# Altium footprint library Transistor.PcbLib: 8 footprints
Each footprint in its own frame and in the unit in brackets; x right, y up, seen from the top. Pads: shape width x height; smd on the part's side, far side on the other; paste and mask are expansions set on the pad; w line width, h text height; cw(c..) or ccw(c..) is an arc to the next point about the centre after c.
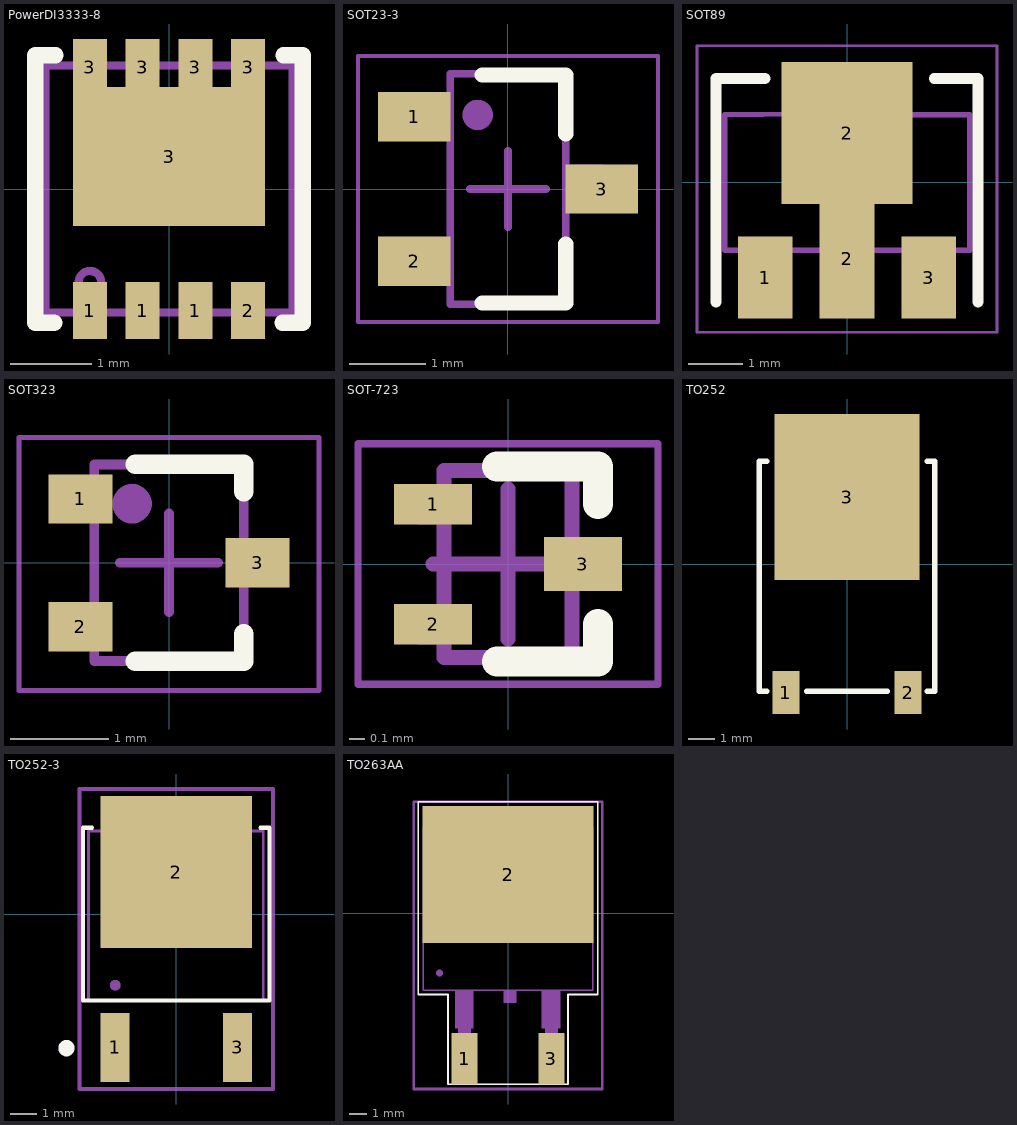
[diagram p0: the footprints below, top view; thin cyan lines are the x and y axes]

## PowerDI3333-8 [mm]
pads (9):
  rect 0.42x0.7 smd: 1(-0.975,-1.5) 1(-0.325,-1.5) 1(0.325,-1.5) 2(0.975,-1.5) 3(-0.975,1.5) 3(-0.325,1.5) 3(0.325,1.5) 3(0.975,1.5)
  rect 2.37x1.71 smd: 3(0,0.4)
Top Overlay:
  lines w0.2: -1.416,-1.65 -1.65,-1.65 -1.65,1.65 -1.4,1.65 ; 1.4,-1.65 1.65,-1.65 1.65,1.65 1.412,1.65
Top Assembly (Mech13):
  circle w0.1: c-0.975,-1.15 r0.139
  rectangle: 0.815,1.55 1.135,1.65
  rectangle: 0.165,1.55 0.485,1.65
  rectangle: -0.485,1.55 -0.165,1.65
  rectangle: -1.135,1.55 -0.815,1.65
  region: 1.65,0 1.525,0 1.525,-0.1 1.65,-0.1
  rectangle: -1.65,-0.1 -1.525,0
  rectangle: 0.815,-1.65 1.135,-1.55
  rectangle: 0.165,-1.65 0.485,-1.55
  rectangle: -0.485,-1.65 -0.165,-1.55
  rectangle: -1.135,-1.65 -0.815,-1.55
  lines w0.1: -1.525,-1.525 -1.525,1.525 1.525,1.525 1.525,-1.525 -1.525,-1.525
  text ".Designator" at -2.499,-0.167 h0.5
3D body "PowerDI3333-8_Type-UX.STP": height 0.76, standoff 0.01, extent -1.65,-1.65 1.65,1.65

## SOT23-3 [mm] "SOT23, 3-Leads, Body 2.92x2.51mm, Pitch 0.95mm, IPC Medium Density"
height 1.12
pads (3):
  rect 0.95x0.65 smd: 1(-1.235,0.95) 2(-1.235,-0.95) 3(1.235,0)
Top Overlay:
  lines w0.2: -0.34,-1.5 0.76,-1.5 0.76,-0.725 ; -0.34,1.5 0.76,1.5 0.76,0.725
Top Assembly (Mech13):
  circle w0.3: c-0.4,0.975 r0.05
  rectangle: -1.26,0.65 -0.76,1.275
  rectangle: -1.26,-1.275 -0.76,-0.65
  rectangle: 0.76,-0.3 1.26,0.325
  lines w0.1: -0.76,-1.52 0.76,-1.52 0.76,1.52 -0.76,1.52 -0.76,-1.52
  text ".Designator" at -0.217,3.249 h0.65
Mechanical 15:
  lines w0.05: -1.975,-1.75 1.975,-1.75 1.975,1.75 -1.975,1.75 -1.975,-1.75
  lines w0.1: -0.5,0 0.5,0 ; 0,-0.5 0,0.5
3D body "SOT-23.step": height 1.11, standoff 0.01, extent -1.283,-1.5 1.217,1.5

## SOT89 [mm]
pads (4):
  rect 1x1.5 smd: 1(-1.5,-1.75) 3(1.5,-1.75)
  rect 1x2.2 smd: 2(0,-1.4)
  rect 2.4x2.6 smd: 2(0,0.9)
Top Overlay:
  lines w0.2: -2.4,-2.2 -2.4,1.9 -1.5,1.9 ; 1.6,1.9 2.4,1.9 2.4,-2.2
Top Assembly (Mech13):
  region: 1.275,-2.25 1.725,-2.25 1.725,-1.25 1.275,-1.25
  region: -0.225,-2.25 0.225,-2.25 0.225,-1.25 -0.225,-1.25
  region: -1.725,-2.25 -1.275,-2.25 -1.275,-1.25 -1.725,-1.25
  region: -0.8,1.25 0.8,1.25 0.8,1.5 0.55,1.75 -0.55,1.75 -0.8,1.5
  lines w0.1: 0.8,1.25 -0.8,1.25 ; -0.8,1.25 -2.24,1.24 -2.24,-1.25 2.25,-1.25 2.25,1.24 0.8,1.24 0.8,1.5 0.55,1.75 -0.55,1.75 -0.8,1.5 -0.8,1.25
  text ".Designator" at -2.499,-0.167 h0.5
Mechanical 15:
  lines w0.05: -2.75,-2.75 -2.75,2.5 2.75,2.5 2.75,-2.75 -2.75,-2.75
  lines w0.1: -0.5,0 0.5,0 ; 0,-0.5 0,0.5
3D body "SOT-89.step": height 1.51, standoff 0.01, extent -2.25,-2.25 2.25,1.75

## SOT323 [mm] "SOT23, 3-Leads, Body 2.92x2.51mm, Pitch 0.95mm, IPC Medium Density"
height 1.12
pads (3):
  rect 0.65x0.5 smd: 1(-0.9,0.65) 2(-0.9,-0.65) 3(0.9,0)
Top Overlay:
  lines w0.2: -0.34,-1 0.76,-1 0.76,-0.725 ; -0.34,1 0.76,1 0.76,0.725
Top Assembly (Mech13):
  circle w0.3: c-0.375,0.6 r0.05
  rectangle: -1.05,0.5 -0.76,0.8
  rectangle: -1.05,-0.8 -0.757,-0.5
  rectangle: 0.76,-0.15 1.05,0.15
  lines w0.1: -0.76,-1 0.76,-1 0.76,1 -0.76,1 -0.76,-1
  text ".Designator" at 0.118,1.465 h0.3
Mechanical 15:
  lines w0.05: -1.525,-1.3 1.525,-1.3 1.525,1.275 -1.525,1.275 -1.525,-1.3
  lines w0.1: -0.5,0 0.5,0 ; 0,-0.5 0,0.5
3D body "SOT-323 v0.step": height 0.96, standoff 0.01, extent -1.05,-1 1.05,1

## SOT-723 [mm] "SOT23, 3-Leads, Body 1.20x1.20mm, Pitch 0.40mm, IPC Medium Density"
height 0.55
pads (3):
  rect 0.52x0.27 smd: 1(-0.5,0.4) 2(-0.5,-0.4)
  rect 0.52x0.36 smd: 3(0.5,0)
Top Overlay:
  lines w0.2: -0.075,-0.65 0.425,-0.65 0.6,-0.65 0.6,-0.4 ; -0.075,0.65 0.425,0.65 0.6,0.65 0.6,0.4
Top Assembly (Mech13):
  rectangle: -0.6,0.265 -0.423,0.535
  rectangle: -0.6,-0.535 -0.42,-0.265
  rectangle: 0.425,-0.18 0.6,0.18
  lines w0.1: -0.425,-0.625 0.425,-0.625 0.425,0.625 -0.425,0.625 -0.425,-0.625
  text ".Designator" at 0.1,-0.581 h0.2
Mechanical 15:
  lines w0.05: -1,-0.8 1,-0.8 1,0.8 -1,0.8 -1,-0.8
  lines w0.1: -0.5,0 0.5,0 ; 0,-0.5 0,0.5
3D body "SOT-723.step": height 0.55, standoff 0, extent -0.6,-0.6 0.6,0.6

## TO252 [mm]
pads (3):
  rect 1x1.6 smd: 1(-2.28,-4.8) 2(2.28,-4.8)
  rect 5.4x6.2 smd: 3(0,2.5)
Top Overlay:
  lines w0.2: -3.277,-4.75 -3,-4.75 ; -3.277,3.835 -3,3.835 ; -1.5,-4.75 1.5,-4.75 ; 3,-4.75 3.277,-4.75 ; 3,3.835 3.277,3.835
  lines w0.203: -3.277,-4.75 -3.277,3.835 ; 3.277,3.835 3.277,-4.75
3D body "TO-252AA.step": height 2.31, standoff 0.01, extent -3.29,-5.473 3.29,4.227

## TO252-3 [mil]
pads (3):
  rect 42x102 smd paste+0 mask+0: 1(-90,-195.87) 3(90,-195.87)
  rect 222x224 smd paste-112 mask-112: 2(0,62)
Top Overlay:
  circle w20: c-161.42,-196.85 r1.93
  lines w6: -124.1,127 -137,127 -137,-127 137,-127 137,127 124.1,127
Top Assembly (Mech13):
  circle w11.81: c-89.57,-104.41 r1.97
  rectangle: -105.22,-228.78 -75.1,-144.87
  rectangle: 74.78,-228.78 104.9,-144.87
  rectangle: -102.47,122.4 102.36,162.49
  lines w3.94: -128.94,122.05 -128.94,-126.97 127.95,-126.97 127.95,122.4 -128.94,122.4
  text ".Designator" at -148.21,-10.11 h29.53
Mechanical 15:
  lines w6: -142,-256.87 -142,184 142,184 142,-256.87 -142,-256.87
3D body "TO-252AA.step": height 91.05, standoff 0.5, extent -129.52,-215.48 129.52,166.41

## TO263AA [mm]
pads (3):
  rect 1.5x3 smd: 1(-2.54,-8.5) 3(2.54,-8.5)
  rect 10x8 smd: 2(0,2.25)
Top Overlay:
  lines w0.1: -5.25,-4.75 -5.25,6.5 0,6.5 5.25,6.5 5.25,-4.75 3.5,-4.75 3.5,-10 0,-10 -3.5,-10 -3.5,-4.75 -5.25,-4.75
Top Assembly (Mech13):
  circle w0.3: c-4,-3.5 r0.05
  rectangle: 1.97,-6.75 3.073,-4.508
  rectangle: -3.11,-6.75 -2.007,-4.508
  rectangle: -0.265,-5.25 0.5,-4.545
  rectangle: 2.15,-9.603 2.915,-6.5
  rectangle: -2.93,-9.603 -2.165,-6.5
  region: 4.95,4.981 0,4.981 0,5.847 3.45,5.847
  region: -4.95,4.981 0,4.981 0,5.847 -3.45,5.847
  lines w0.1: -4.785,-4.508 -1.992,-4.508 4.785,-4.508 ; -4.75,-4.508 -4.95,-4.508 -4.95,4.981 -3.45,5.847 0,5.847 3.45,5.847 4.95,4.981 4.949,-4.5 4.766,-4.5
  text ".Designator" at -5.014,-0.34 h1
Mechanical 15:
  lines w0.152: -5.5,-10.275 5.5,-10.275 5.5,6.5 -5.5,6.5 -5.5,-10.275
3D body "TO263-2.STEP": height 4.78, standoff -0.24, extent -5.08,-9.416 5.08,5.847